# Altium schematic symbol library NT_Other_Passives.SchLib: 7 symbols
Pins are listed as number, name and electrical type; pins without a type are passive.

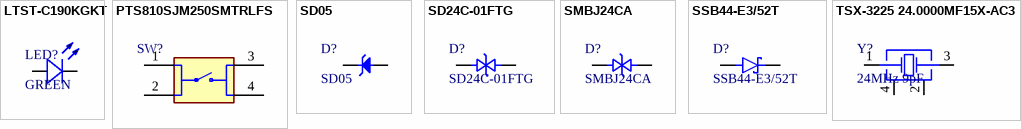
[diagram p0: symbols LTST-C190KGKT to TSX-3225 24.0000MF15X-AC3]

## LTST-C190KGKT
designator LED?, comment GREEN
LED yellow green 0603 wavelength 567.5nm~576.5nm light intensity 18mcd~71mcd Front Mounting; Manufacturer: Diodes Inc.; Manufacturer Part Number: LTST-C190KGKT; Dominant Wavelength: 571nm; Forward Current: 30mA; Forward Voltage: 2.15V; Lens Color: Clear, Colorless; Lens Style: Clear; Luminous Intensity: 35mcd; Number of Circuits: 1; Peak Wavelength: 574nm; Power Dissipation: 75mW; Reverse Voltage: 5V; Shape: Rectangular; Test Current: 20mA; Viewing Angle: 130°; Supplier 1: DigiKey; RoHS: Compliant; Category: LEDs; Stock 1: 2033232; Pricing 1: 1=0.13, 10=0.088, 100=0.0603, 500=0.04758, 1000=0.04332, 2000=0.03968 (USD); Case/Package: 0603; Case Code (Imperial): 0603; Case Code (Metric): 1608; China RoHS: Compliant; Color: Green; Depth: 800µm; Height: 800µm; Illumination Color: Green; Lead Free: Lead Free; Length: 1.6mm; Lens Transparency: Clear; Lifecycle Status: Production; Max Operating Temperature: 85°C; Min Operating Temperature: -30°C; Mount: Surface Mount; Number of Elements: 1; Number of LEDs: 1; Number of Pins: 2; Number of Terminals: 2; Power Rating: 75mW; Radiation Hardening: No; REACH SVHC: Yes; Schedule B: 8541402000, 8541402000|8541402000|8541402000|8541402000|8541402000|8541402000|8541402000|8541402000|8541402000|8541402000|8541402000|8541402000|8541402000|8541402000|8541402000|8541402000|8541402000|8541402000|8541402000|8541402000|8541402000|8541402000|8541402000|85; Terminal Pitch: 1.5mm; Wavelength: 574nm; Width: 800µm; ComponentLink1URL: https://datasheet.octopart.com:443/LTST-C190KGKT-Lite-On-datasheet-86397316.pdf?src-supplier=ODG+(Origin+Data+Global); ComponentLink1Description: https://datasheet.octopart.com:443/LTST-C190KGKT-Lite-On-datasheet-86397316.pdf?src-supplier=ODG+(Origin+Data+Global); ComponentLink2URL: https://datasheet.octopart.com:443/LTST-C190KGKT-Lite-On-datasheet-180605179.pdf?src-supplier=IHS; ComponentLink2Description: https://datasheet.octopart.com:443/LTST-C190KGKT-Lite-On-datasheet-180605179.pdf?src-supplier=IHS; ComponentLink3URL: https://datasheet.octopart.com:443/LTST-C190KGKT-Lite-On-datasheet-13693967.pdf?src-supplier=Factory+Futures; ComponentLink3Description: https://datasheet.octopart.com:443/LTST-C190KGKT-Lite-On-datasheet-13693967.pdf?src-supplier=Factory+Futures; ComponentLink4URL: https://datasheet.octopart.com:443/LTST-C190KGKT-Lite-On-datasheet-165573809.pdf?src-supplier=TME; ComponentLink4Description: https://datasheet.octopart.com:443/LTST-C190KGKT-Lite-On-datasheet-165573809.pdf?src-supplier=TME; ComponentLink5URL: https://datasheet.octopart.com:443/LTST-C190KGKT-Lite-On-datasheet-165573808.pdf?src-supplier=TME; ComponentLink5Description: https://datasheet.octopart.com:443/LTST-C190KGKT-Lite-On-datasheet-165573808.pdf?src-supplier=TME; ComponentLink6URL: https://datasheet.octopart.com:443/LTST-C190KGKT-Lite-On-datasheet-43775815.pdf?src-supplier=TME; ComponentLink6Description: https://datasheet.octopart.com:443/LTST-C190KGKT-Lite-On-datasheet-43775815.pdf?src-supplier=TME; ComponentLink7URL: https://datasheet.octopart.com:443/LTST-C190KGKT-Lite-On-datasheet-32046999.pdf?src-supplier=Future+Electronics; ComponentLink7Description: https://datasheet.octopart.com:443/LTST-C190KGKT-Lite-On-datasheet-32046999.pdf?src-supplier=Future+Electronics; ComponentLink8URL: https://datasheet.octopart.com:443/LTST-C190KGKT-Lite-On-datasheet-8326678.pdf?src-supplier=Future+Electronics; ComponentLink8Description: https://datasheet.octopart.com:443/LTST-C190KGKT-Lite-On-datasheet-8326678.pdf?src-supplier=Future+Electronics; ComponentLink9URL: https://datasheet.octopart.com:443/LTST-C190KGKT-Lite-On-datasheet-78838574.pdf?src-supplier=Future+Electronics; ComponentLink9Description: https://datasheet.octopart.com:443/LTST-C190KGKT-Lite-On-datasheet-78838574.pdf?src-supplier=Future+Electronics; ComponentLink10URL: https://datasheet.octopart.com:443/LTST-C190KGKT-Lite-On-datasheet-158288.pdf?src-supplier=Mouser; ComponentLink10Description: https://datasheet.octopart.com:443/LTST-C190KGKT-Lite-On-datasheet-158288.pdf?src-supplier=Mouser; ComponentLink11URL: https://datasheet.octopart.com:443/LTST-C190KGKT-Lite-On-datasheet-49281.pdf?src-supplier=DigiKey; ComponentLink11Description: https://datasheet.octopart.com:443/LTST-C190KGKT-Lite-On-datasheet-49281.pdf?src-supplier=DigiKey; ComponentLink12URL: https://datasheet.octopart.com:443/LTST-C190KGKT-Lite-On-datasheet-14174998.pdf?src-supplier=iiiC; ComponentLink12Description: https://datasheet.octopart.com:443/LTST-C190KGKT-Lite-On-datasheet-14174998.pdf?src-supplier=iiiC
footprint 0603_LED
pins: A V+, C V-

## PTS810SJM250SMTRLFS
designator SW?, comment SPST N.O. Button  (value not drawn)
Switch Tactile N.O. SPST Button J-Bend 0.05A 16V 150000Cycles 1.569N SMD T/R; Manufacturer: C&K Components; Manufacturer Part Number: PTS810SJM250SMTRLFS; Actuator Length: 711.2µm; Contact Current Rating: 50mA; Contact Resistance: 500mΩ; Electrical Life: 150kcycles; Illumination Type: Non-Illuminated; Insulation Resistance: 100MΩ; Number of Positions: 1; Operating Force: 1.57N; Switch Function: Off-Mom; Switch Travel: 150µm; Supplier 1: DigiKey; RoHS: Compliant; Category: Tactile Switches; Stock 1: 70955; Pricing 1: 1=0.58, 10=0.501, 25=0.4672, 100=0.4173, 250=0.38652, 500=0.36488, 1000=0.34488 (USD); Case/Package: SMD/SMT; Color: Black; Contact Plating: Silver; Country of Origin: Mainland China; Current Rating: 50mA; Depth: 4.6mm; Export Control Classification Number (ECCN) Code: EAR99; Height: 1.8mm; Harmonized Tariff Schedule (HTS) Code: 8536.50.90.40; Introduction Date: 2013-03-04; Lead Free: Lead Free; Length: 4.2mm; Life (Cycles): 150kcycles; Lifecycle Status: Production; Max Current Rating: 50mA; Max Operating Temperature: 85°C; Max Voltage Rating (DC): 16V; Mechanical Life: 150kcycles; Manufacturer Package Identifier: PTS810SJM250SMTRLFS; Min Operating Temperature: -40°C; Mount: Surface Mount; Number of Pins: 4; Orientation: Straight; REACH SVHC: Yes; Termination: Solder; Throw Configuration: SPST; Voltage Rating (DC): 16V; ComponentLink1URL: https://datasheet.octopart.com:443/PTS810SJM250SMTRLFS-C%26K-Components-datasheet-180017475.pdf?src-supplier=IHS; ComponentLink1Description: https://datasheet.octopart.com:443/PTS810SJM250SMTRLFS-C%26K-Components-datasheet-180017475.pdf?src-supplier=IHS; ComponentLink2URL: https://datasheet.octopart.com:443/PTS810SJM250SMTRLFS-C%26K-Components-datasheet-67873722.pdf?src-supplier=Upverter; ComponentLink2Description: https://datasheet.octopart.com:443/PTS810SJM250SMTRLFS-C%26K-Components-datasheet-67873722.pdf?src-supplier=Upverter; ComponentLink3URL: https://datasheet.octopart.com:443/PTS810-SJM-250-SMTR-LFS-C%26K-Components-datasheet-41562126.pdf?src-supplier=Upverter; ComponentLink3Description: https://datasheet.octopart.com:443/PTS810-SJM-250-SMTR-LFS-C%26K-Components-datasheet-41562126.pdf?src-supplier=Upverter; ComponentLink4URL: https://datasheet.octopart.com:443/PTS810SJM250SMTR-LFS-C%26K-Components-datasheet-181955281.pdf?src-supplier=Farnell; ComponentLink4Description: https://datasheet.octopart.com:443/PTS810SJM250SMTR-LFS-C%26K-Components-datasheet-181955281.pdf?src-supplier=Farnell; ComponentLink5URL: https://datasheet.octopart.com:443/PTS810SJM250SMTRLFS-C%26K-Components-datasheet-134606748.pdf?src-supplier=TME; ComponentLink5Description: https://datasheet.octopart.com:443/PTS810SJM250SMTRLFS-C%26K-Components-datasheet-134606748.pdf?src-supplier=TME; ComponentLink6URL: https://datasheet.octopart.com:443/PTS810-SJM-250-SMTR-LFS-C%26K-Components-datasheet-151508687.pdf?src-supplier=TME; ComponentLink6Description: https://datasheet.octopart.com:443/PTS810-SJM-250-SMTR-LFS-C%26K-Components-datasheet-151508687.pdf?src-supplier=TME; ComponentLink7URL: http://sigma.octopart.com:80/reach_statement/ITT-company-18.pdf?src-supplier=Compliance+Statements; ComponentLink7Description: http://sigma.octopart.com:80/reach_statement/ITT-company-18.pdf?src-supplier=Compliance+Statements
footprint SW4_PTS815 SJM 250 SMTR LFS_CNK
pins: 1, 2, 3, 4

## SD05
designator D?
Trans Voltage Suppressor Diode, 350W, 5V V(RWM), Unidirectional, 1 Element, Silicon; Manufacturer: Sangdest Microelectronics; Clamping Voltage: 14.5V; Min Breakdown Voltage: 6V; Number of Elements: 1; Peak Reverse Current: 10µA; Supplier 1: DigiKey; Manufacturer Part Number: SD05; RoHS: Compliant; Category: TVS Diodes; Stock 1: 13210; Pricing 1: 1=0.27, 10=0.165, 100=0.1025, 500=0.0752, 1000=0.06636 (USD); Lifecycle Status: Production; Max Operating Temperature: 125°C; Min Operating Temperature: -55°C; Number of Terminals: 2; Peak Pulse Power: 350W; Polarity: Unidirectional; REACH SVHC: Yes; Reverse Standoff Voltage: 5V; ComponentLink1URL: https://datasheet.octopart.com:443/SD05-SMC-Diode-Solutions-datasheet-181400473.pdf?src-supplier=IHS; ComponentLink1Description: https://datasheet.octopart.com:443/SD05-SMC-Diode-Solutions-datasheet-181400473.pdf?src-supplier=IHS; Supplier Part Number 1: 1655-SD05CT-ND
footprint DIO_MM3Z3V0T1G
pins: A, K

## SD24C-01FTG
designator D?
SD Series 42 V 7 A 450 W Surface Mount Bidirectional TVS Diode - SOD-323; Manufacturer: Littelfuse; Breakdown Voltage: 26.7V; Capacitance: 50pF; Clamping Voltage: 42V; Element Configuration: Single; Leakage Current: 1µA; Max Power Dissipation: 450W; Max Surge Current: 7A; Number of Bidirectional Channels: 1; Operating Supply Voltage: 24V; Power Line Protection: No; Supplier 1: DigiKey; Manufacturer Part Number: SD24C-01FTG; RoHS: Compliant; Category: TVS Diodes; Stock 1: 22762; Pricing 1: 1=0.66, 10=0.407, 100=0.2598, 500=0.19638, 1000=0.17589 (USD); Case/Package: SOD; Composition: Zener; Depth: 1.4mm; Direction: Bidirectional; Height: 1.14mm; Lead Free: Lead Free; Length: 1.8mm; Lifecycle Status: Production; Max Operating Temperature: 125°C; Min Breakdown Voltage: 26.7V; Min Operating Temperature: -40°C; Mount: Surface Mount; Number of Channels: 1; Number of Elements: 1; Number of Pins: 2; Number of Terminals: 2; Peak Pulse Current: 7A; Peak Pulse Power: 450W; Polarity: Bidirectional; Radiation Hardening: No; Ratings: AEC-Q101; REACH SVHC: Yes; Reverse Standoff Voltage: 24V; Schedule B: 8536300000, 8536300000|8536300000|8536300000|8536300000|8536300000; Termination: SMD/SMT; Working Voltage: 24V; ComponentLink1URL: https://datasheet.octopart.com:443/SD24C-01FTG-Littelfuse-datasheet-168252985.pdf?src-supplier=Newark; ComponentLink1Description: https://datasheet.octopart.com:443/SD24C-01FTG-Littelfuse-datasheet-168252985.pdf?src-supplier=Newark; ComponentLink2URL: https://datasheet.octopart.com:443/SD24C-01FTG-Littelfuse-datasheet-32866225.pdf?src-supplier=Newark; ComponentLink2Description: https://datasheet.octopart.com:443/SD24C-01FTG-Littelfuse-datasheet-32866225.pdf?src-supplier=Newark; ComponentLink3URL: https://datasheet.octopart.com:443/SD24C-01FTG-Littelfuse-datasheet-138797050.pdf?src-supplier=ODG+(Origin+Data+Global); ComponentLink3Description: https://datasheet.octopart.com:443/SD24C-01FTG-Littelfuse-datasheet-138797050.pdf?src-supplier=ODG+(Origin+Data+Global); ComponentLink4URL: https://datasheet.octopart.com:443/SD24C-01FTG-Littelfuse-datasheet-78834560.pdf?src-supplier=Farnell; ComponentLink4Description: https://datasheet.octopart.com:443/SD24C-01FTG-Littelfuse-datasheet-78834560.pdf?src-supplier=Farnell; ComponentLink5URL: https://datasheet.octopart.com:443/SD24C-01FTG-Littelfuse-datasheet-42901060.pdf?src-supplier=Fuses+Unlimited; ComponentLink5Description: https://datasheet.octopart.com:443/SD24C-01FTG-Littelfuse-datasheet-42901060.pdf?src-supplier=Fuses+Unlimited; ComponentLink6URL: https://datasheet.octopart.com:443/SD24C-01FTG-Littelfuse-datasheet-173466928.pdf?src-supplier=Future+Electronics; ComponentLink6Description: https://datasheet.octopart.com:443/SD24C-01FTG-Littelfuse-datasheet-173466928.pdf?src-supplier=Future+Electronics; ComponentLink7URL: https://datasheet.octopart.com:443/SD24C-01FTG-Littelfuse-datasheet-137408339.pdf?src-supplier=RS+(Formerly+Allied+Electronics); ComponentLink7Description: https://datasheet.octopart.com:443/SD24C-01FTG-Littelfuse-datasheet-137408339.pdf?src-supplier=RS+(Formerly+Allied+Electronics); Supplier Part Number 1: F6446CT-ND
footprint FP-SD-C-MFG
pins: 1, 2

## SMBJ24CA
designator D?
Diode; 15.5 A (Max.); 26.70 V (Min.) @ 1 mA; 5 uA (Max.) @ 24 V; 100 A (Max.); Manufacturer: Littelfuse; Breakdown Voltage: 28.1V; Clamping Voltage: 38.9V; Direction: Bidirectional; Element Configuration: Single; ESD Protection: Yes; Leakage Current: 1µA; Max Breakdown Voltage: 29.5V; Max Junction Temperature (Tj): 150°C; Max Power Dissipation: 5W; Max Surge Current: 15.5A; Min Breakdown Voltage: 26.7V; Number of Bidirectional Channels: 1; Operating Supply Voltage: 24V; Peak Pulse Power: 600W; Power Line Protection: No; Test Current: 1mA; Supplier 1: Arrow Electronics; Manufacturer Part Number: SMBJ24CA; RoHS: Compliant; Category: TVS Diodes; Stock 1: 36000; Pricing 1: 3000=0.0667 (USD); Case/Package: SMB; China RoHS: Non-Compliant; Composition: Zener; Country of Origin: Mainland China, Philippines; Export Control Classification Number (ECCN) Code: EAR99; Height: 2.61mm; Harmonized Tariff Schedule (HTS) Code: 8541.10.00.50; Introduction Date: 1996-01-01; Lead Free: Lead Free; Length: 4.5466mm; Lifecycle Status: Production; Max Operating Temperature: 150°C; Max Reverse Leakage Current: 1µA; Min Operating Temperature: -65°C; Mount: Surface Mount; Number of Channels: 1; Number of Elements: 1; Number of Pins: 2; Number of Terminals: 2; Packaging: Tape & Reel; Peak Pulse Current: 15.5A; Peak Reverse Current: 1µA; Polarity: Bidirectional; Power Rating: 600W; Radiation Hardening: No; REACH SVHC: No; Reverse Breakdown Voltage: 26.7V; Reverse Standoff Voltage: 24V; Reverse Voltage: 24V; Schedule B: 8541100080, 8541100080|8541100080|8541100080|8541100080|8541100080; Termination: SMD/SMT; Voltage Rating (DC): 24V; Width: 3.937mm; ComponentLink1URL: https://datasheet.octopart.com:443/SMBJ24CA-Littelfuse-datasheet-180609570.pdf?src-supplier=IHS; ComponentLink1Description: https://datasheet.octopart.com:443/SMBJ24CA-Littelfuse-datasheet-180609570.pdf?src-supplier=IHS; ComponentLink2URL: https://datasheet.octopart.com:443/SMBJ24CA-Littelfuse-datasheet-27889791.pdf?src-supplier=Upverter; ComponentLink2Description: https://datasheet.octopart.com:443/SMBJ24CA-Littelfuse-datasheet-27889791.pdf?src-supplier=Upverter; ComponentLink3URL: https://datasheet.octopart.com:443/SMBJ24CA-Littelfuse-datasheet-63710821.pdf?src-supplier=Farnell; ComponentLink3Description: https://datasheet.octopart.com:443/SMBJ24CA-Littelfuse-datasheet-63710821.pdf?src-supplier=Farnell; ComponentLink4URL: https://datasheet.octopart.com:443/SMBJ24CA-Littelfuse-datasheet-145017494.pdf?src-supplier=Farnell; ComponentLink4Description: https://datasheet.octopart.com:443/SMBJ24CA-Littelfuse-datasheet-145017494.pdf?src-supplier=Farnell; ComponentLink5URL: https://datasheet.octopart.com:443/SMBJ24CA-Littelfuse-datasheet-10854588.pdf?src-supplier=element14+APAC; ComponentLink5Description: https://datasheet.octopart.com:443/SMBJ24CA-Littelfuse-datasheet-10854588.pdf?src-supplier=element14+APAC; ComponentLink6URL: https://datasheet.octopart.com:443/SMBJ24CA-Littelfuse-datasheet-5319440.pdf?src-supplier=element14+APAC; ComponentLink6Description: https://datasheet.octopart.com:443/SMBJ24CA-Littelfuse-datasheet-5319440.pdf?src-supplier=element14+APAC; ComponentLink7URL: https://datasheet.octopart.com:443/SMBJ24CA-Littelfuse-datasheet-98958142.pdf?src-supplier=LKR; ComponentLink7Description: https://datasheet.octopart.com:443/SMBJ24CA-Littelfuse-datasheet-98958142.pdf?src-supplier=LKR; ComponentLink8URL: https://datasheet.octopart.com:443/SMBJ24CA-Littelfuse-datasheet-871.pdf?src-supplier=Newark; ComponentLink8Description: https://datasheet.octopart.com:443/SMBJ24CA-Littelfuse-datasheet-871.pdf?src-supplier=Newark; ComponentLink9URL: https://datasheet.octopart.com:443/SMBJ24CA-Littelfuse-datasheet-123574.pdf?src-supplier=Newark; ComponentLink9Description: https://datasheet.octopart.com:443/SMBJ24CA-Littelfuse-datasheet-123574.pdf?src-supplier=Newark; ComponentLink10URL: https://datasheet.octopart.com:443/SMBJ24CA-Littelfuse-datasheet-9692587.pdf?src-supplier=RS+(Formerly+Allied+Electronics); ComponentLink10Description: https://datasheet.octopart.com:443/SMBJ24CA-Littelfuse-datasheet-9692587.pdf?src-supplier=RS+(Formerly+Allied+Electronics); ComponentLink11URL: https://datasheet.octopart.com:443/SMBJ24CA-Littelfuse-datasheet-22888.pdf?src-supplier=RS+(Formerly+Allied+Electronics); ComponentLink11Description: https://datasheet.octopart.com:443/SMBJ24CA-Littelfuse-datasheet-22888.pdf?src-supplier=RS+(Formerly+Allied+Electronics); Supplier Part Number 1: SMBJ24CA
footprint SMBJSeries_LTF
pins: 1, 2

## SSB44-E3/52T
designator D?
Schottky diode forward voltage drop (Vf) 490mV@4A DC reverse withstand voltage (Vr) 40V; Manufacturer: Vishay; Average Rectified Current: 4A; Element Configuration: Single; Forward Voltage: 420mV; Max Forward Surge Current (Ifsm): 100A; Max Junction Temperature (Tj): 150°C; Max Reverse Leakage Current: 400µA; Number of Elements: 1; Polarity: Standard; Supplier 1: DigiKey; Manufacturer Part Number: SSB44-E3/52T; RoHS: Compliant; Category: Schottky Diodes; Stock 1: 92846; Pricing 1: 1=0.84, 10=0.52, 100=0.3353 (USD); Case/Package: SMB; China RoHS: Non-Compliant; Contact Plating: Tin; Current Rating: 4A; Forward Current: 4A; Height: 2.44mm; Lead Free: Lead Free; Length: 4.5466mm; Lifecycle Status: Production; Max Operating Temperature: 150°C; Max Output Current: 4A; Max Repetitive Reverse Voltage (Vrrm): 40V; Max Reverse Voltage (DC): 40V; Max Surge Current: 100A; Manufacturer Package Identifier: SSB44-E3/52T; Min Operating Temperature: -65°C; Mount: Surface Mount; Number of Pins: 2; Number of Terminals: 2; Output Current: 4A; Packaging: Cut Tape; Peak Non-Repetitive Surge Current: 100A; Peak Reverse Current: 400µA; Radiation Hardening: No; REACH SVHC: No; Reverse Standoff Voltage: 40V; Schedule B: 8541100080, 8541100080|8541100080|8541100080|8541100080|8541100080; Voltage Rating (DC): 40V; ComponentLink1URL: https://datasheet.octopart.com:443/SSB44-E3-52T-Vishay-datasheet-181475158.pdf?src-supplier=Newark; ComponentLink1Description: https://datasheet.octopart.com:443/SSB44-E3-52T-Vishay-datasheet-181475158.pdf?src-supplier=Newark; ComponentLink2URL: https://datasheet.octopart.com:443/SSB44-E3-52T-Vishay-datasheet-11777709.pdf?src-supplier=Newark; ComponentLink2Description: https://datasheet.octopart.com:443/SSB44-E3-52T-Vishay-datasheet-11777709.pdf?src-supplier=Newark; ComponentLink3URL: https://datasheet.octopart.com:443/SSB44-E3-52T-Vishay-datasheet-10060009.pdf?src-supplier=Newark; ComponentLink3Description: https://datasheet.octopart.com:443/SSB44-E3-52T-Vishay-datasheet-10060009.pdf?src-supplier=Newark; ComponentLink4URL: https://datasheet.octopart.com:443/SSB44-E3-52T-Vishay-datasheet-8331249.pdf?src-supplier=Newark; ComponentLink4Description: https://datasheet.octopart.com:443/SSB44-E3-52T-Vishay-datasheet-8331249.pdf?src-supplier=Newark; ComponentLink5URL: https://datasheet.octopart.com:443/SSB44-E3-52T-Vishay-datasheet-22977460.pdf?src-supplier=Newark; ComponentLink5Description: https://datasheet.octopart.com:443/SSB44-E3-52T-Vishay-datasheet-22977460.pdf?src-supplier=Newark; ComponentLink6URL: https://datasheet.octopart.com:443/SSB44-E3-52T-Vishay-datasheet-21270664.pdf?src-supplier=Newark; ComponentLink6Description: https://datasheet.octopart.com:443/SSB44-E3-52T-Vishay-datasheet-21270664.pdf?src-supplier=Newark; ComponentLink7URL: https://datasheet.octopart.com:443/SSB44-E3-52T-Vishay-datasheet-46750820.pdf?src-supplier=Upverter; ComponentLink7Description: https://datasheet.octopart.com:443/SSB44-E3-52T-Vishay-datasheet-46750820.pdf?src-supplier=Upverter; ComponentLink8URL: https://sigma.octopart.com:443/138898578/technical_drawing/Vishay-SSB44-E3-52T.pdf?src-supplier=Upverter; ComponentLink8Description: https://sigma.octopart.com:443/138898578/technical_drawing/Vishay-SSB44-E3-52T.pdf?src-supplier=Upverter; ComponentLink9URL: https://datasheet.octopart.com:443/SSB44-E3-52T-Vishay-datasheet-62319260.pdf?src-supplier=element14+APAC; ComponentLink9Description: https://datasheet.octopart.com:443/SSB44-E3-52T-Vishay-datasheet-62319260.pdf?src-supplier=element14+APAC; ComponentLink10URL: https://datasheet.octopart.com:443/SSB44-E3-52T-Vishay-datasheet-54005.pdf?src-supplier=element14+APAC; ComponentLink10Description: https://datasheet.octopart.com:443/SSB44-E3-52T-Vishay-datasheet-54005.pdf?src-supplier=element14+APAC; ComponentLink11URL: https://datasheet.octopart.com:443/SSB44-E3/52T-Vishay-datasheet-14186728.pdf?src-supplier=iiiC; ComponentLink11Description: https://datasheet.octopart.com:443/SSB44-E3/52T-Vishay-datasheet-14186728.pdf?src-supplier=iiiC; ComponentLink12URL: https://datasheet.octopart.com:443/SSB44-E3/52T-Vishay-datasheet-9732905.pdf?src-supplier=RS+(Formerly+Allied+Electronics); ComponentLink12Description: https://datasheet.octopart.com:443/SSB44-E3/52T-Vishay-datasheet-9732905.pdf?src-supplier=RS+(Formerly+Allied+Electronics); ComponentLink13URL: https://datasheet.octopart.com:443/SSB44-E3-52T-Vishay-datasheet-7601381.pdf?src-supplier=Jameco; ComponentLink13Description: https://datasheet.octopart.com:443/SSB44-E3-52T-Vishay-datasheet-7601381.pdf?src-supplier=Jameco; ComponentLink14URL: https://datasheet.octopart.com:443/SSB44-E3/52T-Vishay-datasheet-128407.pdf?src-supplier=DigiKey; ComponentLink14Description: https://datasheet.octopart.com:443/SSB44-E3/52T-Vishay-datasheet-128407.pdf?src-supplier=DigiKey; ComponentLink15URL: http://sigma.octopart.com:80/rohs_statement/Vishay-company-15.pdf?src-supplier=Compliance+Statements; ComponentLink15Description: http://sigma.octopart.com:80/rohs_statement/Vishay-company-15.pdf?src-supplier=Compliance+Statements; Supplier Part Number 1: SSB44-E3/52TGICT-ND
footprint DIODE_DO214AA_MBRS_VIS-M
pins: A, C

## TSX-3225 24.0000MF15X-AC3
designator Y?, comment 24MHz 9pF
Crystal 24MHz ±10ppm (Tol) ±15ppm (Stability) 9pF FUND 40Ohm 4-Pin Mini-CSMD T/R; Manufacturer: Epson; Manufacturer Part Number: TSX-3225 24.0000MF15X-AC3; ESR (Equivalent Series Resistance): 40Ω; Frequency Tolerance: 0.001%; Supplier 1: DigiKey; RoHS: Compliant; Category: Crystals; Stock 1: 44842; Pricing 1: 1=0.82, 10=0.714, 25=0.6748, 50=0.647, 100=0.6202 (USD); Case/Package: SMD/SMT; China RoHS: Compliant; Frequency: 24MHz; Frequency Stability: 15ppm; Height: 609.6µm; Lead Free: Lead Free; Length: 3.2004mm; Lifecycle Status: Production; Load Capacitance: 9pF; Max Operating Temperature: 85°C; Min Operating Temperature: -40°C; Mount: Surface Mount; REACH SVHC: Yes; Schedule B: 8541600060, 8541600060|8541600060|8541600060|8541600060|8541600060; Series Resistance: 40Ω; Termination: SMD/SMT; Tolerance: 0.001%; Weight: 15.989131mg; Width: 2.4892mm; ComponentLink1URL: https://datasheet.octopart.com:443/TSX-3225-24.0000MF15X-AC3-Epson-datasheet-61114919.pdf?src-supplier=ODG+(Origin+Data+Global); ComponentLink1Description: https://datasheet.octopart.com:443/TSX-3225-24.0000MF15X-AC3-Epson-datasheet-61114919.pdf?src-supplier=ODG+(Origin+Data+Global); ComponentLink2URL: https://datasheet.octopart.com:443/TSX-322524.0000MF15X-AC3-Epson-datasheet-180707711.pdf?src-supplier=IHS; ComponentLink2Description: https://datasheet.octopart.com:443/TSX-322524.0000MF15X-AC3-Epson-datasheet-180707711.pdf?src-supplier=IHS; ComponentLink3URL: https://datasheet.octopart.com:443/TSX-3225-24.0000MF15X-AC3-Epson-datasheet-141944207.pdf?src-supplier=Arrow.cn; ComponentLink3Description: https://datasheet.octopart.com:443/TSX-3225-24.0000MF15X-AC3-Epson-datasheet-141944207.pdf?src-supplier=Arrow.cn; ComponentLink4URL: http://sigma.octopart.com:80/149135495/reach_statement/Epson-TSX-3225-24.0000MF15X-AC3.pdf?src-supplier=Compliance+Statements; ComponentLink4Description: http://sigma.octopart.com:80/149135495/reach_statement/Epson-TSX-3225-24.0000MF15X-AC3.pdf?src-supplier=Compliance+Statements; ComponentLink5URL: http://sigma.octopart.com:80/149135496/rohs_statement/Epson-TSX-3225-24.0000MF15X-AC3.pdf?src-supplier=Compliance+Statements; ComponentLink5Description: http://sigma.octopart.com:80/149135496/rohs_statement/Epson-TSX-3225-24.0000MF15X-AC3.pdf?src-supplier=Compliance+Statements
footprint OSCCC320X250X60
pins: 1, 2, 3, 4